# Altium footprint library AMPHENOL_10018783-11111TLF.PcbLib: 1 footprints
Each footprint in its own frame and in the unit in brackets; x right, y up, seen from the top. Pads: shape width x height; smd on the part's side, far side on the other; paste and mask are expansions set on the pad; w line width, h text height; cw(c..) or ccw(c..) is an arc to the next point about the centre after c.
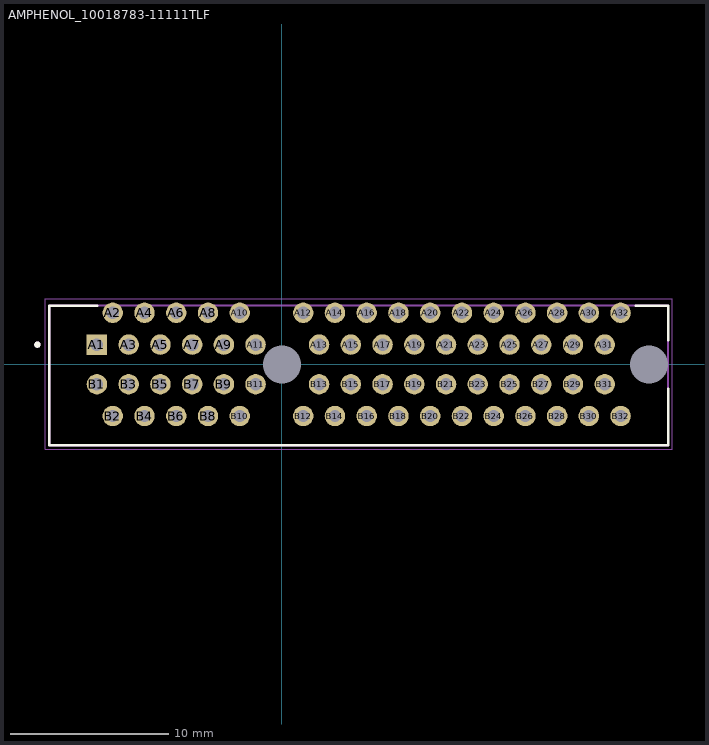
[diagram p0: the footprint, top view; thin cyan lines are the x and y axes]

## AMPHENOL_10018783-11111TLF [mm]
height 11.25
pads (66):
  rect 1.288x1.288 / inner round 1.288 / far side rect 1.288x1.288 hole 0.78: A1(-11.65,1.25)
  round 1.288 hole 0.78: A2(-10.65,3.25) A3(-9.65,1.25) A4(-8.65,3.25) A5(-7.65,1.25) A6(-6.65,3.25) A7(-5.65,1.25) A8(-4.65,3.25) A9(-3.65,1.25) A10(-2.65,3.25) A11(-1.65,1.25) A12(1.35,3.25) A13(2.35,1.25) A14(3.35,3.25) A15(4.35,1.25) A16(5.35,3.25) A17(6.35,1.25) A18(7.35,3.25) A19(8.35,1.25) A20(9.35,3.25) A21(10.35,1.25) A22(11.35,3.25) A23(12.35,1.25) A24(13.35,3.25) A25(14.35,1.25) A26(15.35,3.25) A27(16.35,1.25) A28(17.35,3.25) A29(18.35,1.25) A30(19.35,3.25) A31(20.35,1.25) A32(21.35,3.25) B1(-11.65,-1.25) B2(-10.65,-3.25) B3(-9.65,-1.25) B4(-8.65,-3.25) B5(-7.65,-1.25) B6(-6.65,-3.25) B7(-5.65,-1.25) B8(-4.65,-3.25) B9(-3.65,-1.25) B10(-2.65,-3.25) B11(-1.65,-1.25) B12(1.35,-3.25) B13(2.35,-1.25) B14(3.35,-3.25) B15(4.35,-1.25) B16(5.35,-3.25) B17(6.35,-1.25) B18(7.35,-3.25) B19(8.35,-1.25) B20(9.35,-3.25) B21(10.35,-1.25) B22(11.35,-3.25) B23(12.35,-1.25) B24(13.35,-3.25) B25(14.35,-1.25) B26(15.35,-3.25) B27(16.35,-1.25) B28(17.35,-3.25) B29(18.35,-1.25) B30(19.35,-3.25) B31(20.35,-1.25) B32(21.35,-3.25)
  round 0 hole 2.4 unplated: ""(0,0) ""(23.15,0)
Top Overlay:
  circle w0.2: c-15.4,1.25 r0.1
  lines w0.15: -11.614,3.7 -14.65,3.7 -14.65,-5.1 24.35,-5.1 24.35,-1.52 ; 22.314,3.7 24.35,3.7 24.35,1.52
Bottom Overlay:
  circle w0.2: c-13.335,1.27 r0.1
Mechanical 13:
  circle w0.2: c-15.4,1.25 r0.1
  lines w0.127: -14.65,-5.1 24.35,-5.1 24.35,3.7 -14.65,3.7 -14.65,-5.1
Mechanical 15:
  lines w0.05: -14.9,-5.35 24.6,-5.35 24.6,4.144 -14.9,4.144 -14.9,-5.35
3D body "step_temp.STEP": height 11.25, standoff -4.65, extent -14.65,-5.1 24.35,3.7